# Altium schematic symbol library IMU.SchLib: 2 symbols
Pins are listed as number, name and electrical type; pins without a type are passive.

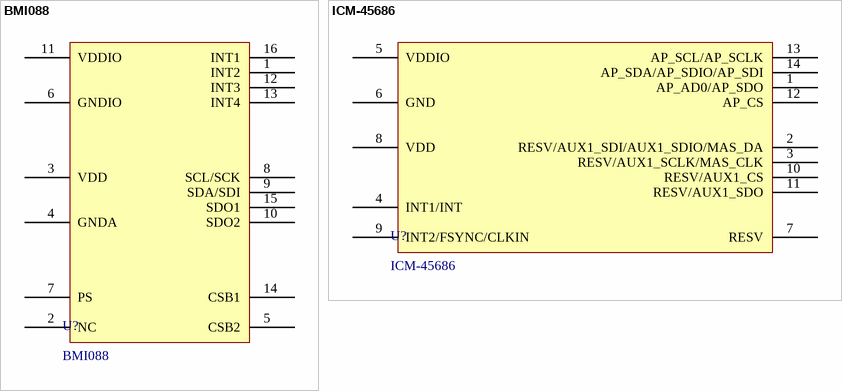
[diagram p0: symbols BMI088 to ICM-45686]

## BMI088
designator U?
6-axis MotionTracking for High-performance Applications; Manufacturer: Bosch; Interface Type: I2C, SPI; Output Type: Digital; Acceleration: 3 g, 6 g, 12 g, 24 g; Resolution: 16 bit; Sensitivity: 1365 LSB/g, 16.4 LSB/deg/s; Rate Noise Density: 230 ug/sqrt Hz, 0.014 deg/s/sqrt Hz; Bandwidth: 8 Hz to 685 Hz; Current Rating: 5.15 mA; Supply Voltage - Max: 3.6 V; Supply Voltage - Min: 2.4 V; Sensor Type: 6-axis; ComponentLink1Description: Datasheet; ComponentLink1URL: https://www.lcsc.com/datasheet/C194919.pdf?spm=wm.sxq.inf.ggs___wm.ssy.em.0.tz&lcsc_vid=FlkIUABWQVJeAgZfQwdWUlcFT1ZYUV1ST1deUwVWQ1IxVlNfQ1JWUlFWTlNcXjsOAxUeFF5JWBYZEEoKFBINSQcJGk4eFQsCAgIaSgADAwAHC0slQ1FaVFZfWQkaCgg%3D; LCSC Part #: C194919; Manufacturer Part Number: BMI088; Mount: SMD/SMT; Operating Temperature Max: + 85 C; Operating Temperature Min: - 40 C; Package / Case: LGA-16; Packaging: Tape and Reel; Supplier 1 Part Number: 262-BMI088; Supplier 1 URL: https://www.mouser.vn/en/ProductDetail/Bosch-Sensortec/BMI088?qs=f9yNj16SXrIMFspTV6RB6Q%3D%3D; Supplier 1: Mouser; Supplier 2 Part Number: 828-1082-2-ND; Supplier 2 URL: https://www.digikey.com/en/products/detail/bosch-sensortec/bmi088/8634936; Supplier 2: Digi-Key; Supplier 3 Part Number: N/A; Supplier 3 URL: N/A; Supplier 3: thegioiic; Value: BMI088
footprint BMI088_LGA-16 (PQFN, 16-Leads, Body 4.50x3.00mm, Pitch 0.50mm, IPC Medium Density)
pins: 1 INT2, 2 NC, 3 VDD, 4 GNDA, 5 CSB2, 6 GNDIO, 7 PS, 8 SCL/SCK, 9 SDA/SDI, 10 SDO2, 11 VDDIO, 12 INT3, 13 INT4, 14 CSB1, 15 SDO1, 16 INT1

## ICM-45686
designator U?
High Performance Dual-Interface (UI + AUX) 6-Axis MEMS MotionTracking Device; Manufacturer: TDK InvenSense; Interface Type: I2C, I3C, SPI; Output Type: Analog and Digital; Acceleration: 2 g, 4 g, 8 g, 16 g, 32 g; Resolution: 16 bit; Sensitivity: 16384 LSB/g; Rate Noise Density: 70 µg/sqrt Hz, 0.0038 deg/s/sqrt Hz; Bandwidth: 100 Hz; Current Rating: 420 uA; Supply Voltage - Max: 3.6 V; Supply Voltage - Min: 1.71 V; Sensor Type: 6-axis; ComponentLink1Description: Datasheet; ComponentLink1URL: https://www.lcsc.com/datasheet/C22459454.pdf?spm=wm.sxq.inf.ggs___wm.fly.bg.0.xh&lcsc_vid=FlkIUABWQVJeAgZfQwdWUlcFT1ZYUV1ST1deUwVWQ1IxVlNfQ1JWUlFVRldWUDsOAxUeFF5JWBYZEEoKFBINSQcJGk4eFQsCAgIaSgADAwAHC0slRlhaXlVfWQkaCgg%3D; LCSC Part #: C22459454; Manufacturer Part Number: ICM-45686; Mount: SMD/SMT; Operating Temperature Max: + 85 C; Operating Temperature Min: - 40 C; Package / Case: LGA-14; Packaging: Tape and Reel; Supplier 1 Part Number: 410-ICM-45686; Supplier 1 URL: https://www.mouser.vn/en/ProductDetail/TDK-InvenSense/ICM-45686?qs=vvQtp7zwQdPk96IFOwypvQ%3D%3D; Supplier 1: Mouser; Supplier 2 Part Number: 1428-ICM-45686TR-ND; Supplier 2 URL: https://www.digikey.com/en/products/detail/tdk-invensense/icm-45686/24374985; Supplier 2: Digi-Key; Supplier 3 Part Number: N/A; Supplier 3 URL: N/A; Supplier 3: thegioiic; Value: ICM-45686
footprint ICM-45686_LGA-14 (PQFN, 14-Leads, Body 3.00x2.50mm, Pitch 0.50mm, IPC Medium Density)
pins: 1 AP_AD0/AP_SDO, 2 RESV/AUX1_SDI/AUX1_SDIO/MAS_DA, 3 RESV/AUX1_SCLK/MAS_CLK, 4 INT1/INT, 5 VDDIO, 6 GND, 7 RESV, 8 VDD, 9 INT2/FSYNC/CLKIN, 10 RESV/AUX1_CS, 11 RESV/AUX1_SDO, 12 AP_CS, 13 AP_SCL/AP_SCLK, 14 AP_SDA/AP_SDIO/AP_SDI